# Altium schematic symbol library 1N457A.SchLib: 1 symbol
Pins are listed as number, name and electrical type; pins without a type are passive.

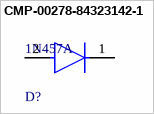
[diagram p0: symbol CMP-00278-84323142-1]

## CMP-00278-84323142-1
designator D?, comment 1N457A
1N457A Diode Standard Recovery Rectifier 70 Volt 0.2A 2-Pin DO-35 Bulk; Manufacturer Lifecycle Status: ACTIVE; NexarPartId: 84323142; Max Reverse Voltage (DC): 70V; Power Dissipation: 500mW; Forward Current: 200mA; Element Configuration: Single; Peak Non-Repetitive Surge Current: 4A; Max Forward Surge Current (Ifsm): 1A; Capacitance: 8pF; Peak Reverse Current: 25nA; Max Junction Temperature (Tj): 175°C; Current: 2A; Forward Voltage: 1V; Case/Package: Axial; Height: 1.91mm; Lead Free: Lead Free; Min Operating Temperature: -65°C; Length: 4.06mm; Weight: 4.535924g; Output Current: 200mA; REACH SVHC: No SVHC; Packaging: Bulk; Voltage Rating (DC): 70V; Width: 1.91mm; Lifecycle Status: Production; Contact Plating: Tin; Polarity: Standard; Number of Pins: 2; Max Surge Current: 4A; Max Operating Temperature: 175°C; Schedule B: 8541100070, 8541100070|8541100070, 8541100070|8541100070|8541100070, 8541100070|8541100070|8541100070|8541100070; Max Repetitive Reverse Voltage (Vrrm): 70V; Mount: Through Hole; Voltage: 70V; Radiation Hardening: No; RoHS: Compliant; Current Rating: 200mA; Reverse Voltage: 70V; Average Rectified Current: 200mA; Termination: Axial
footprint FP-017AG-MFG
pins: 1 C, 2 A